# Altium footprint library PcbLib.PcbLib: 15 footprints
Each footprint in its own frame and in the unit in brackets; x right, y up, seen from the top. Pads: shape width x height; smd on the part's side, far side on the other; paste and mask are expansions set on the pad; w line width, h text height; cw(c..) or ccw(c..) is an arc to the next point about the centre after c.
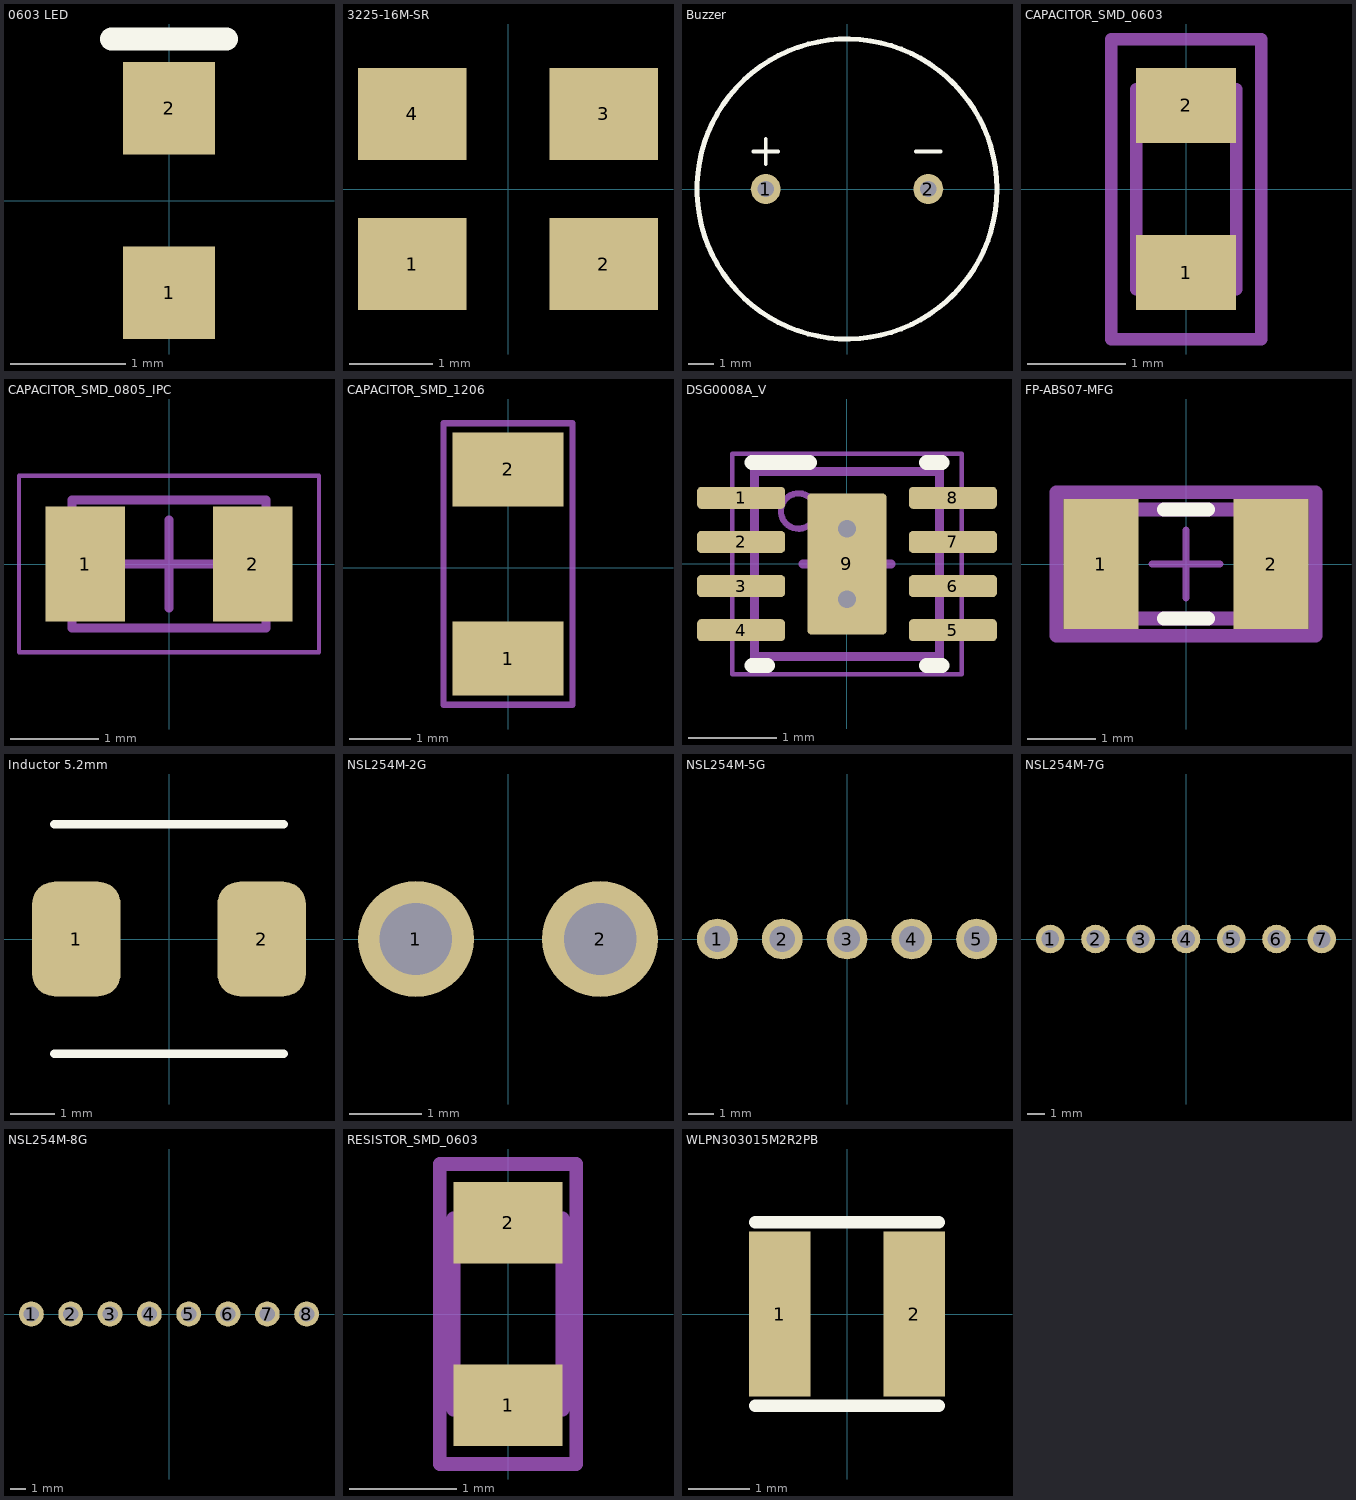
[diagram p0: the footprints below, top view; thin cyan lines are the x and y axes]

## 0603 LED [mm] "standard 0603 LED"
pads (2):
  rect 0.8x0.8 smd: 1(0,-0.8) 2(0,0.8)
Top Overlay:
  lines w0.2: -0.5,1.4 0.5,1.4
3D body "AA1608CGSK.stp": height 0.7, standoff 0, extent -0.4,-0.8 0.4,0.8

## 3225-16M-SR [mm] "2.5 x 3.2 16MHz crystal"
pads (4):
  rect 1.3x1.1 smd: 1(-1.15,-0.9) 2(1.15,-0.9) 3(1.15,0.9) 4(-1.15,0.9)
3D body "KX7 SMD Quartz Crystal Resonator 3.2x2.5mm.step": height 0.61, standoff 0.01, extent -1.6,-1.25 1.6,1.25

## Buzzer [mm] "12mm"
pads (2):
  round 1.2 hole 0.65: 1(-3.25,0) 2(3.25,0)
Top Overlay:
  circle w0.2: c0,0 r6
  lines w0.15: -3.75,1.5 -2.75,1.5 ; -3.25,1 -3.25,2 ; 2.75,1.5 3.75,1.5
3D body "buzzer 12 mm.stp": height 9.01, standoff -5.49, extent -6,-5.989 6,5.989

## CAPACITOR_SMD_0603 [mil]
pads (2):
  rect 40x30 smd: 1(0,-33.46) 2(0,33.46)
Mechanical 13:
  lines w5: -20,-40 20,-40 20,30 20,40 10,40 -10,40 -20,40 -20,30 -20,-40
Mechanical 15:
  lines w5: -30,-60 30,-60 30,60 -30,60 -30,-60
3D body "CAPC-0603-T0.9-BN.stp": height 35.43, standoff 0, extent -17.72,-33.46 17.72,33.46

## CAPACITOR_SMD_0805_IPC [mm] "Chip Capacitor, 2-Leads, Body 2,00x1,25mm, IPC Medium Density"
height 1.45
pads (2):
  rect 0.9x1.3 smd: 1(-0.95,0) 2(0.95,0)
Top Assembly:
  lines w0.1: -1.1,-0.725 -1.1,0.725 1.1,0.725 1.1,-0.725 -1.1,-0.725
Top Courtyard:
  lines w0.05: -1.7,-1 -1.7,1 1.7,1 1.7,-1 -1.7,-1
  lines w0.1: -0.5,0 0.5,0 ; 0,-0.5 0,0.5
3D body "CAPACITOR-SMD_0805_IPC.step": height 1.45, standoff 0, extent -1.1,-0.725 1.1,0.725

## CAPACITOR_SMD_1206 [mm]
pads (2):
  rect 1.8x1.2 smd: 1(0,-1.475) 2(0,1.6)
Mechanical 13:
  lines w0.1: -1.05,-2.225 1.05,-2.225 1.05,2.35 -1.05,2.35 -1.05,-2.225
Mechanical 15:
  lines w0.1: -1.05,-2.225 1.05,-2.225 1.05,2.35 -1.05,2.35 -1.05,-2.225
3D body "CAPC-1206-T1.0-BN.stp": height 1, standoff 0, extent -0.875,-1.675 0.875,1.675

## DSG0008A_V [mm] "SON, 8-Leads, Body 2x2mm, Pitch 0.5mm, Thermal Pad 1.6x0.9mm, TI Recommended"
height 0.8
pads (9):
  rrect40% 1x0.25 smd mask+0.07: 1(-1.2,0.75) 2(-1.2,0.25) 3(-1.2,-0.25) 4(-1.2,-0.75) 5(1.2,-0.75) 6(1.2,-0.25) 7(1.2,0.25) 8(1.2,0.75)
  rrect11% 0.9x1.6 smd paste-0.45 mask+0.07: 9(0,0)
via 0,0.4 diameter 0.5 hole 0.2
via 0,-0.4 diameter 0.5 hole 0.2
Top Overlay:
  lines w0.17: -1.075,-1.15 -0.9,-1.15 ; -1.075,1.15 -0.425,1.15 ; 0.9,-1.15 1.075,-1.15 ; 0.9,1.15 1.075,1.15
Top Paste:
  rectangle: -0.427,-0.733 0.427,0.733
Mechanical 1:
  text ".Designator" at -0.925,-0.25 h0.51
Mechanical 13:
  circle w0.07: c-0.55,0.6 r0.2
  lines w0.1: -1.05,-1.05 -1.05,1.05 1.05,1.05 1.05,-1.05 -1.05,-1.05
Mechanical 15:
  lines w0.05: -1.3,-1.25 1.3,-1.25 1.3,1.25 -1.3,1.25 -1.3,-1.25
  lines w0.1: -0.5,0 0.5,0 ; 0,-0.5 0,0.5
3D body: height 0.8, standoff 0, extent -1.05,-1.05 1.05,1.05
3D body: height 0.8, standoff 0.5, extent -0.749,0.401 -0.351,0.799

## FP-ABS07-MFG [mm]
pads (2):
  rect 1.1x1.9 smd paste+0 mask+0: 1(-1.25,0) 2(1.25,0)
Top Overlay:
  lines w0.2: -0.325,-0.8 0.325,-0.8 ; -0.325,0.8 0.325,0.8
Top Assembly:
  lines w0.2: -1.9,-1.05 1.9,-1.05 1.9,1.05 -1.9,1.05 -1.9,-1.05
Top Courtyard:
  lines w0.2: -1.9,-1.05 1.9,-1.05 1.9,1.05 -1.9,1.05 -1.9,-1.05
Top 3D Body:
  lines w0.2: -1.65,-0.8 1.65,-0.8 1.65,0.8 -1.65,0.8 -1.65,-0.8
Top Component Center:
  lines w0.1: -0.5,0 0.5,0 ; 0,-0.5 0,0.5
3D body "Crys_Abracon_ABS07-166-32_768KHZ-T_eec.STEP": height 0.25, standoff 0, extent -1.9,-1.05 1.9,1.05

## Inductor 5.2mm [mm]
pads (2):
  rrect50% 2x2.6 smd: 1(-2.1,0) 2(2.1,0)
Top Overlay:
  lines w0.2: -2.6,-2.6 2.6,-2.6 ; -2.6,2.6 2.6,2.6
3D body "User Library-FERROCORE HPI0530-100.step": height 3.11, standoff 0.01, extent -2.8,-2.5 2.8,2.5

## NSL254M-2G [mm] "2pin, 2.54mm THT connector"
pads (2):
  round 1.6 hole 1: 1(-1.27,0) 2(1.27,0)

## NSL254M-5G [mm] "5pin, 2.54mm THT connector"
pads (5):
  round 1.6 hole 1: 1(-5.08,0) 2(-2.54,0) 3(0,0) 4(2.54,0) 5(5.08,0)

## NSL254M-7G [mm] "7pin, 2.54mm THT connector"
pads (7):
  round 1.6 hole 1: 1(-7.62,0) 2(-5.08,0) 3(-2.54,0) 4(0,0) 5(2.54,0) 6(5.08,0) 7(7.62,0)

## NSL254M-8G [mm] "8pin, 2.54mm THT connector"
pads (8):
  round 1.6 hole 1: 1(-8.89,0) 2(-6.35,0) 3(-3.81,0) 4(-1.27,0) 5(1.27,0) 6(3.81,0) 7(6.35,0) 8(8.89,0)

## RESISTOR_SMD_0603 [mil]
pads (2):
  rect 40x30 smd: 1(0,-33.46) 2(0,33.46)
Mechanical 13:
  lines w5: -20,-35 20,-35 20,35 -20,35 -20,-35
Mechanical 15:
  lines w5: -25,-55 25,-55 25,55 -25,55 -25,-55
3D body "RESC-0603.stp": height 21.65, standoff 0, extent -17.72,-33.46 17.72,33.46

## WLPN303015M2R2PB [mm] "2.2uH small SMD inductor"
pads (2):
  rect 1x2.7 smd: 1(-1.1,0) 2(1.1,0)
Top Overlay:
  lines w0.2: -1.5,-1.5 1.5,-1.5 ; -1.5,1.5 1.5,1.5
3D body "srn3010-220m.stp": height 1.01, standoff 0.01, extent -1.501,-1.5 1.501,1.5